# EAGLE library part AVRISP (library madhu)
AVR 6-pin ISP connector
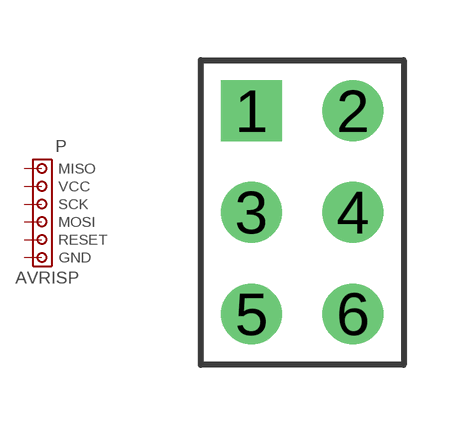
[diagram p1: symbol with the pads of AVRISP; footprint AVRISP]

Designator prefix P

## AVRISP  [AVRISP]
1  MISO  pas
2  VCC  pas
3  SCK  pas
4  MOSI  pas
5  RESET  pas
6  GND  pas

## Footprint AVRISP (pad centres in mm)
AVR ISP connector grid 2.5 mm, outline 2.4 x 4.4 mm
drill 1.016 square: 1 -1.27,2.54
drill 1.016: 2 1.27,2.54; 3 -1.27,0; 4 1.27,0; 5 -1.27,-2.54; 6 1.27,-2.54